# Altium footprint library PBL - SMD Packages.PcbLib: 144 footprints (part 1 of 9)
Each footprint in its own frame and in the unit in brackets; x right, y up, seen from the top. Pads: shape width x height; smd on the part's side, far side on the other; paste and mask are expansions set on the pad; w line width, h text height; cw(c..) or ccw(c..) is an arc to the next point about the centre after c.
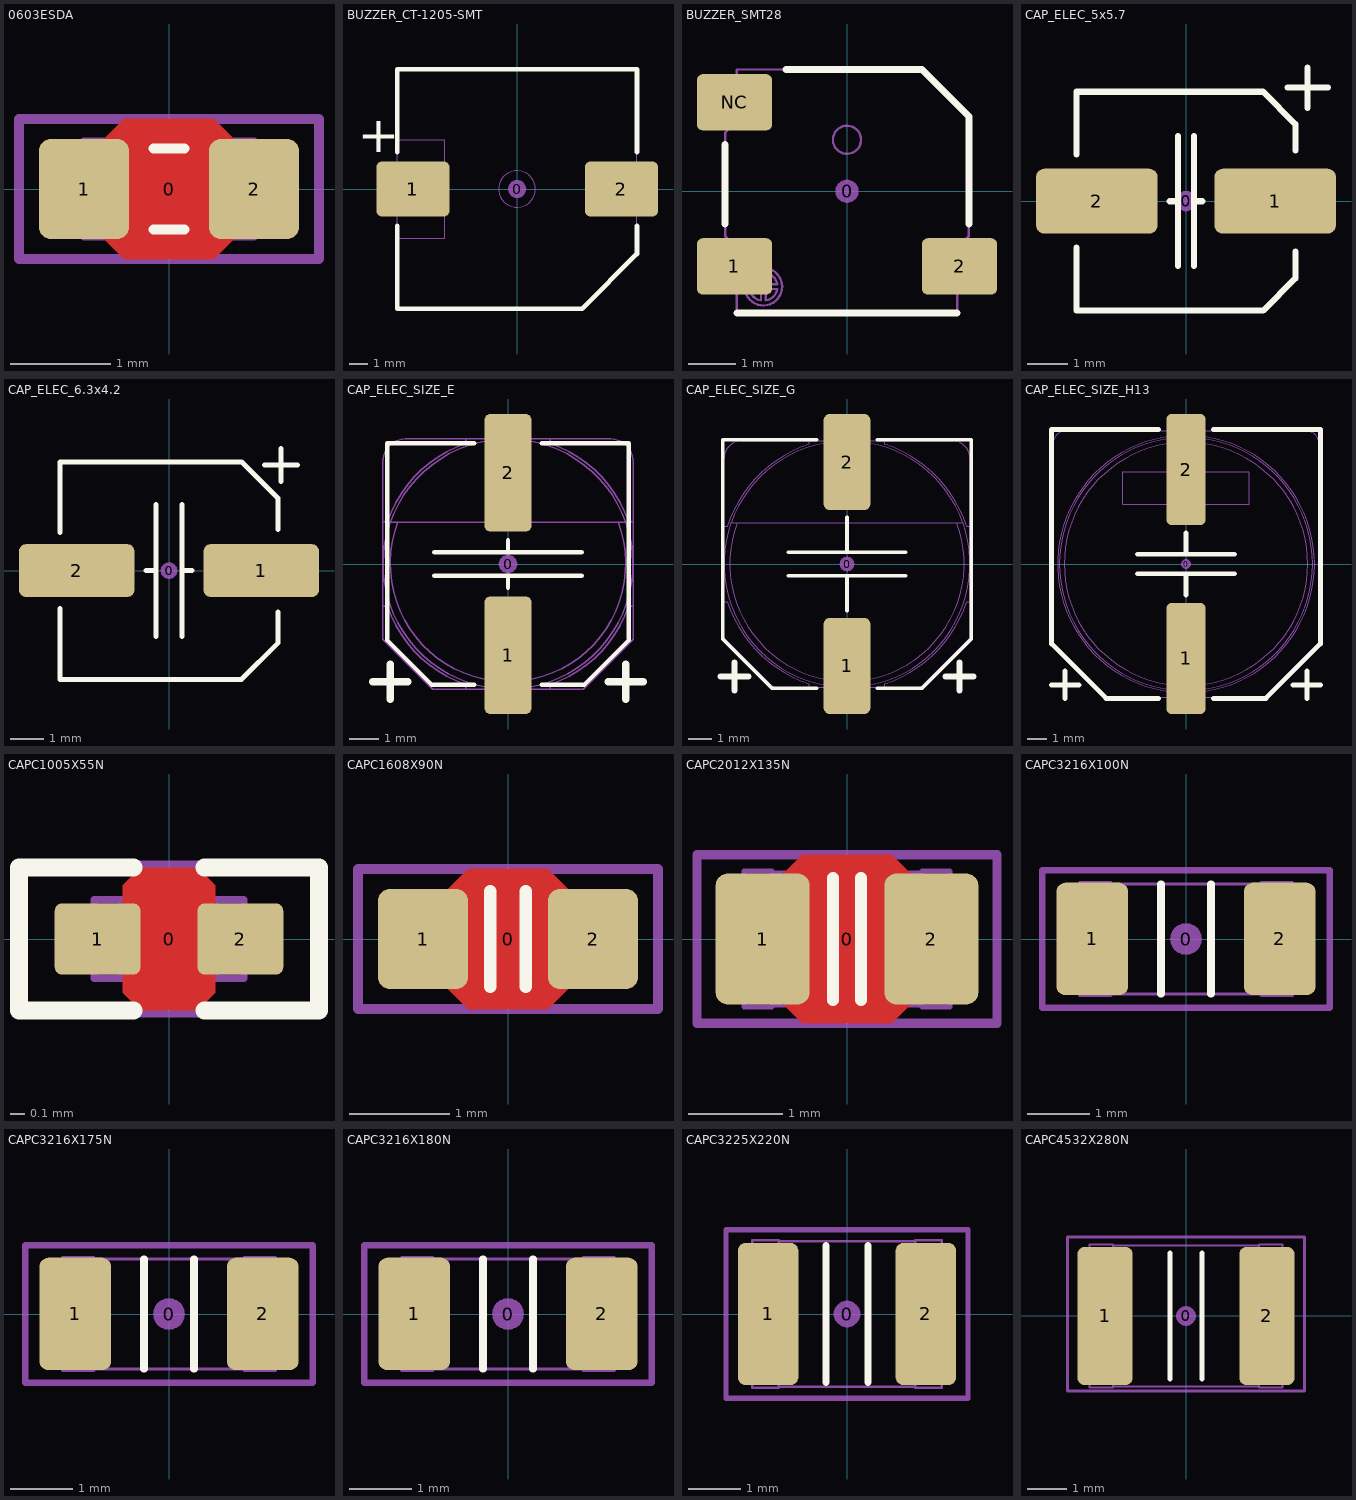
[diagram p0: the footprints below, top view; thin cyan lines are the x and y axes]

## 0603ESDA [mm] "Chip ESD suppressor, Body 1.6x0.8mm, 0603, IPC Medium Density"
height 0.8
pads (3):
  round 0.254 on Mech15: 0(0,0)
  rrect25% 0.9x1 smd: 1(-0.85,0) 2(0.85,0)
Top Layer:
  pour cut-out: -0.65,0.5 -0.45,0.7 0.45,0.7 0.65,0.5 0.65,-0.5 0.45,-0.7 -0.45,-0.7 -0.65,-0.5
Top Overlay:
  lines w0.102: -0.152,-0.406 0.152,-0.406 ; -0.152,0.406 0.152,0.406
13 - 3D Top Side:
  lines w0.076: -0.85,-0.475 0.85,-0.475 0.85,0.475 -0.85,0.475 -0.85,-0.475
15 - Top Courtyards:
  lines w0.1: -1.5,-0.7 1.5,-0.7 1.5,0.7 -1.5,0.7 -1.5,-0.7
3D body: height 0.79, standoff -0.01, extent -0.85,-0.45 0.85,0.45

## BUZZER_CT-1205-SMT [mm] "Buzzer SMD sealed 12.8 L x 12.8 W x 7.6mm H 5Vp"
height 7.6
pads (3):
  round 1 on Mech15: 0(0,0)
  rrect20% 4x3 smd: 1(-5.7,0) 2(5.7,0)
Top Overlay:
  lines w0.254: -6.55,-2 -6.55,-6.55 3.55,-6.55 6.55,-3.55 6.55,-2 ; -6.55,2 -6.55,6.55 6.55,6.55 6.55,2
  text "+" at -8.7,2 h2
13 - 3D Top Side:
  circle w0.05: c0,0 r1
  lines w0.05: -6.65,-1.15 -6.65,1.15 ; -6.55,-2.7 -3.95,-2.7 -3.95,2.7 -6.55,2.7 ; -6.55,-1.15 -7.15,-1.15 -7.15,1.15 -6.55,1.15 ; 6.55,-1.15 7.15,-1.15 7.15,1.15 6.55,1.15 ; 6.65,-1.15 6.65,1.15 ; -6.55,-6.55 -6.55,6.55 6.55,6.55 6.55,-3.55 3.55,-6.55 -6.55,-6.55
3D body: height 7.6, standoff 0, extent -7.15,-6.55 7.15,6.55

## BUZZER_SMT28 [mm] "Buzzer SMD sealed 5.0 L x 5.0 W x 2.0mm H 5Vp"
height 2.2
pads (4):
  round 0.5 on Mech15: 0(0,0)
  rrect20% 1.6x1.2 smd: 1(-2.4,-1.6) 2(2.4,-1.6) NC(-2.4,1.9)
Top Overlay:
  lines w0.15: -2.6,-0.7 -2.6,1 ; -2.35,-2.6 2.35,-2.6 ; -1.3,2.6 1.6,2.6 2.6,1.6 2.6,-0.7
13 - 3D Top Side:
  circle w0.05: c0,1.1 r0.3
  circle w0.05: c-1.784,-2.034 r0.4
  lines w0.05: -2.65,-1.95 -2.65,-1.25 ; -2.65,1.55 -2.65,2.25 ; -2.35,-1.95 -2.75,-1.95 -2.75,-1.25 -2.35,-1.25 ; -2.35,1.55 -2.75,1.55 -2.75,2.25 -2.35,2.25 ; 2.35,-1.95 2.75,-1.95 2.75,-1.25 2.35,-1.25 ; 2.65,-1.95 2.65,-1.25 ; -2.6,-0.95 -2.6,1.25 -2.35,1.5 -2.35,2.6 1.6,2.6 2.6,1.6 2.6,-0.95 2.35,-1.2 2.35,-2.6 -2.35,-2.6 -2.35,-1.2 -2.6,-0.95 ; -2.08,-2.084 ccw(c-1.784,-2.034) -1.834,-2.33 -1.834,-2.084 -2.08,-2.084 ; -2.08,-1.984 cw(c-1.784,-2.034) -1.834,-1.739 -1.834,-1.984 -2.08,-1.984 ; -1.734,-2.33 ccw(c-1.784,-2.034) -1.489,-2.084 -1.734,-2.084 -1.734,-2.33 ; -1.734,-1.984 -1.489,-1.984 ccw(c-1.784,-2.034) -1.734,-1.739 -1.734,-1.984
3D body: height 2, standoff 0, extent -2.75,-2.6 2.75,2.6

## CAP_ELEC_5x5.7 [mm] "Capacitor, polarized, aluminum can; 5x5.7mm DxH"
height 5.7
pads (3):
  round 0.508 on Mech15: 0(0,0)
  rrect25% 3x1.6 smd: 1(2.2,0) 2(-2.2,0)
Top Overlay:
  lines w0.152: -2.7,-1.15 -2.7,-2.7 1.9,-2.7 2.7,-1.9 2.7,-1.25 ; -2.7,1.15 -2.7,2.7 1.9,2.7 2.7,1.9 2.7,1.25 ; -0.4,0 -0.2,0 ; -0.2,-1.6 -0.2,1.6 ; 0.2,-1.6 0.2,1.6 ; 0.2,0 0.4,0 ; 2.5,2.8 3,2.8 3.5,2.8 ; 3,2.3 3,3.3
3D body: height 5.7, standoff 0, extent -2.65,-2.65 2.65,2.65

## CAP_ELEC_6.3x4.2 [mm] "Capacitor, polarized, aluminum can; 6.3x4.2mm DxH"
height 4.2
pads (3):
  round 0.508 on Mech15: 0(0,0)
  rrect25% 3.5x1.6 smd: 1(2.8,0) 2(-2.8,0)
Top Overlay:
  lines w0.152: -3.3,-1.15 -3.3,-3.3 2.2,-3.3 3.3,-2.2 3.3,-1.25 ; -3.3,1.15 -3.3,3.3 2.2,3.3 3.3,2.2 3.3,1.25 ; -0.7,0 -0.5,0 ; -0.4,-2 -0.4,2 ; 0.4,-2 0.4,2 ; 0.5,0 0.7,0 ; 2.9,3.2 3.4,3.2 3.9,3.2 ; 3.4,2.7 3.4,3.7
3D body: height 4.23, standoff 0, extent -3.3,-3.3 3.3,3.3

## CAP_ELEC_SIZE_E [mm] "Capacitor, polarized, aluminum can; 8.0x6.2mm DxH"
height 6.2
pads (3):
  round 0.635 on Mech15: 0(0,0)
  rrect25% 1.6x4 smd: 1(0,-3.1) 2(0,3.1)
Top Overlay:
  lines w0.152: -2.5,-0.4 2.5,-0.4 ; -2.5,0.4 2.5,0.4 ; -1.15,-4.1 -2.6,-4.1 -4.1,-2.6 -4.1,4.1 -1.15,4.1 ; 0,-0.8 0,-0.4 ; 0,0.4 0,0.8 ; 1.15,-4.1 2.6,-4.1 4.1,-2.6 4.1,4.1 1.15,4.1
  lines w0.254: -4.6,-4 -3.4,-4 ; -4,-4.6 -4,-3.4 ; 3.4,-4 4.6,-4 ; 4,-4.6 4,-3.4
13 - 3D Top Side:
  lines w0.05: -4.25,-1.436 -4.106,-1.436 ccw(c0,0) -1.436,-4.106 -1.436,-4.25 ; -4.25,1.436 -4.106,1.436 cw(c0,0) -1.436,4.106 -1.436,4.25 ; -4.005,1.417 cw(c0,0) 4.005,1.417 ; -3.741,1.417 ccw(c0,0) 3.741,1.417 ; -0.325,-4.25 -0.325,-4.75 0.325,-4.75 0.325,-4.25 ; -0.325,4.25 -0.325,4.75 0.325,4.75 0.325,4.25 ; 1.436,-4.25 1.436,-4.106 ccw(c0,0) 4.106,-1.436 4.25,-1.436 ; 1.436,4.25 1.436,4.106 cw(c0,0) 4.106,1.436 4.25,1.436 ; -4.25,-2.55 -4.25,3.5 cw(c-3.5,3.5) -3.5,4.25 3.5,4.25 cw(c3.5,3.5) 4.25,3.5 4.25,-2.55 2.55,-4.25 -2.55,-4.25 -4.25,-2.55 ; -4.007,1.417 ccw(c0,0) 4.007,1.417 -4.007,1.417
3D body: height 6.5, standoff 0, extent -4.25,-4.75 4.25,4.75

## CAP_ELEC_SIZE_G [mm] "Capacitor, polarized, aluminum can; 10.0x10.2mm DxH"
height 10.2
pads (3):
  round 0.635 on Mech15: 0(0,0)
  rrect25% 2x4.1 smd: 1(0,-4.35) 2(0,4.35)
Top Overlay:
  lines w0.152: -2.5,-0.5 2.5,-0.5 ; -2.5,0.5 2.5,0.5 ; -1.3,-5.3 -3.2,-5.3 -5.3,-3.2 -5.3,5.3 -1.3,5.3 ; 0,-2 0,-0.5 ; 0,0.5 0,2 ; 1.3,-5.3 3.2,-5.3 5.3,-3.2 5.3,5.3 1.3,5.3
  lines w0.254: -5.4,-4.8 -4.2,-4.8 ; -4.8,-5.4 -4.8,-4.2 ; 4.2,-4.8 5.4,-4.8 ; 4.8,-5.4 4.8,-4.2
13 - 3D Top Side:
  lines w0.05: -5.25,-1.601 -5.105,-1.601 ccw(c0,0) -1.601,-5.105 -1.601,-5.25 ; -5.25,1.601 -5.105,1.601 cw(c0,0) -1.601,5.105 -1.601,5.25 ; -4.948,1.75 cw(c0,0) 4.948,1.75 ; -4.684,1.75 ccw(c0,0) 4.684,1.75 ; -0.45,-5.25 -0.45,-6 0.45,-6 0.45,-5.25 ; -0.45,5.25 -0.45,6 0.45,6 0.45,5.25 ; 1.601,-5.25 1.601,-5.105 ccw(c0,0) 5.105,-1.601 5.25,-1.601 ; 1.601,5.25 1.601,5.105 cw(c0,0) 5.105,1.601 5.25,1.601 ; -5.25,-3.15 -3.15,-5.25 3.15,-5.25 5.25,-3.15 5.25,4.5 ccw(c4.5,4.5) 4.5,5.25 -4.5,5.25 ccw(c-4.5,4.5) -5.25,4.5 -5.25,-3.15 ; -4.95,1.75 ccw(c0,0) 4.95,1.75 -4.95,1.75
3D body: height 10.5, standoff 0, extent -5.25,-6 5.25,6

## CAP_ELEC_SIZE_H13 [mm] "Capacitor, polarized, aluminum can; 12.5x13.5mm DxH"
height 13.5
pads (3):
  round 0.508 on Mech15: 0(0,0)
  rrect25% 2x5.7 smd: 1(0,-4.85) 2(0,4.85)
Top Overlay:
  lines w0.254: -6.9,-6.2 -5.5,-6.2 ; -6.2,-6.9 -6.2,-5.5 ; -2.5,-0.5 2.5,-0.5 ; -2.5,0.5 2.5,0.5 ; -1.4,-6.9 -4.1,-6.9 -6.9,-4.1 -6.9,6.9 -1.4,6.9 ; 0,-1.6 0,-0.5 ; 0,0.5 0,1.6 ; 1.4,-6.9 4.1,-6.9 6.9,-4.1 6.9,6.9 1.4,6.9 ; 5.5,-6.2 6.9,-6.2 ; 6.2,-6.9 6.2,-5.5
13 - 3D Top Side:
  circle w0.05: c0,0 r6.6
  circle w0.05: c0,0 r6.5
  circle w0.05: c0,0 r6.25
  lines w0.05: -0.45,-6.85 -0.45,-7.5 0.45,-7.5 0.45,-6.85 ; -0.45,6.85 -0.45,7.5 0.45,7.5 0.45,6.85 ; -6.85,-4.11 -4.11,-6.85 4.11,-6.85 6.85,-4.11 6.85,6.1 ccw(c6.1,6.1) 6.1,6.85 -6.1,6.85 ccw(c-6.1,6.1) -6.85,6.1 -6.85,-4.11 ; -3.25,3.055 -3.25,4.745 3.25,4.745 3.25,3.055 -3.25,3.055
3D body: height 14, standoff 0, extent -6.85,-7.5 6.85,7.5

## CAPC1005X55N [mm] "Chip Capacitor, Body 1.0x0.5mm, EIA 0402, IPC Medium Density"
height 0.55
pads (3):
  round 0.2 on Mech15: 0(0,0)
  rrect20% 0.6x0.5 smd: 1(-0.5,0) 2(0.5,0)
Top Layer:
  pour cut-out: -0.325,0.375 -0.2,0.5 0.2,0.5 0.325,0.375 0.325,-0.375 0.2,-0.5 -0.2,-0.5 -0.325,-0.375
Top Overlay:
  lines w0.127: -0.25,-0.5 -1.05,-0.5 -1.05,0.5 -0.25,0.5 ; 0.25,-0.5 1.05,-0.5 1.05,0.5 0.25,0.5
13 - 3D Top Side:
  lines w0.05: -0.325,-0.255 0.325,-0.255 ; -0.325,0.255 0.325,0.255 ; -0.525,-0.275 -0.525,0.275 -0.325,0.275 -0.325,-0.275 -0.525,-0.275 ; 0.325,-0.275 0.525,-0.275 0.525,0.275 0.325,0.275 0.325,-0.275
15 - Top Courtyards:
  lines w0.1: -1.05,-0.5 -1.05,0.5 1.05,0.5 1.05,-0.5 -1.05,-0.5
3D body: height 0.55, standoff 0, extent -0.525,-0.275 0.525,0.275

## CAPC1608X90N [mm] "Chip Capacitor, Body 1.6x0.8mm, EIA 0603, IPC Medium Density"
height 0.9
pads (3):
  round 0.254 on Mech15: 0(0,0)
  rrect25% 0.9x1 smd: 1(-0.85,0) 2(0.85,0)
Top Layer:
  pour cut-out: -0.6,0.5 -0.4,0.7 0.4,0.7 0.6,0.5 0.6,-0.5 0.4,-0.7 -0.4,-0.7 -0.6,-0.5
Top Overlay:
  lines w0.127: -0.178,-0.476 -0.178,0.476 ; 0.178,-0.476 0.178,0.476
13 - 3D Top Side:
  lines w0.05: -0.55,-0.43 0.55,-0.43 ; -0.55,0.43 0.55,0.43 ; -0.85,-0.45 -0.85,0.45 -0.55,0.45 -0.55,-0.45 -0.85,-0.45 ; 0.55,-0.45 0.55,0.45 0.85,0.45 0.85,-0.45 0.55,-0.45
15 - Top Courtyards:
  lines w0.1: -1.5,-0.7 -1.5,0.7 1.5,0.7 1.5,-0.7 -1.5,-0.7
3D body: height 0.89, standoff -0.01, extent -0.85,-0.45 0.85,0.45

## CAPC2012X135N [mm] "Chip Capacitor, Body 2.0x1.2mm, EIA 0805, IPC Medium Density"
height 1.35
pads (3):
  round 0.254 on Mech15: 0(0,0)
  rrect25% 1x1.4 smd: 1(-0.9,0) 2(0.9,0)
Top Layer:
  pour cut-out: -0.675,0.7 -0.475,0.9 0.475,0.9 0.675,0.7 0.675,-0.7 0.475,-0.9 -0.475,-0.9 -0.675,-0.7
Top Overlay:
  lines w0.127: -0.15,-0.651 -0.15,0.651 ; 0.15,-0.651 0.15,0.651
13 - 3D Top Side:
  lines w0.05: -0.8,-0.705 0.8,-0.705 ; -0.8,0.705 0.8,0.705 ; -1.1,-0.725 -1.1,0.725 -0.8,0.725 -0.8,-0.725 -1.1,-0.725 ; 0.8,-0.725 1.1,-0.725 1.1,0.725 0.8,0.725 0.8,-0.725
15 - Top Courtyards:
  lines w0.1: -1.6,-0.9 -1.6,0.9 1.6,0.9 1.6,-0.9 -1.6,-0.9
3D body: height 1.34, standoff -0.01, extent -1.1,-0.725 1.1,0.725

## CAPC3216X100N [mm] "Chip Capacitor, Body 3.2x1.6mm, 1.0mm H, EIA 1206, IPC Medium Density"
height 1
pads (3):
  round 0.508 on Mech15: 0(0,0)
  rrect25% 1.15x1.8 smd: 1(-1.5,0) 2(1.5,0)
Top Overlay:
  lines w0.127: -0.4,-0.876 -0.4,0.876 ; 0.4,-0.876 0.4,0.876
13 - 3D Top Side:
  lines w0.05: -1.2,-0.88 1.2,-0.88 ; -1.2,0.88 1.2,0.88 ; -1.7,-0.9 -1.7,0.9 -1.2,0.9 -1.2,-0.9 -1.7,-0.9 ; 1.2,-0.9 1.2,0.9 1.7,0.9 1.7,-0.9 1.2,-0.9
15 - Top Courtyards:
  lines w0.1: -2.3,-1.1 2.3,-1.1 2.3,1.1 -2.3,1.1 -2.3,-1.1
3D body: height 1, standoff 0, extent -1.7,-0.9 1.7,0.9

## CAPC3216X175N [mm] "Chip Capacitor, Body 3.2x1.6mm, 1.75mm H, EIA 1206, IPC Medium Density"
height 1.75
pads (3):
  round 0.508 on Mech15: 0(0,0)
  rrect25% 1.15x1.8 smd: 1(-1.5,0) 2(1.5,0)
Top Overlay:
  lines w0.127: -0.4,-0.876 -0.4,0.876 ; 0.4,-0.876 0.4,0.876
13 - 3D Top Side:
  lines w0.05: -1.2,-0.88 1.2,-0.88 ; -1.2,0.88 1.2,0.88 ; -1.7,-0.9 -1.2,-0.9 -1.2,0.9 -1.7,0.9 -1.7,-0.9 ; 1.2,-0.9 1.7,-0.9 1.7,0.9 1.2,0.9 1.2,-0.9
15 - Top Courtyards:
  lines w0.1: -2.3,-1.1 -2.3,1.1 2.3,1.1 2.3,-1.1 -2.3,-1.1
3D body: height 1.75, standoff 0, extent -1.7,-0.9 1.7,0.9

## CAPC3216X180N [mm] "Chip Capacitor, Body 3.2x1.6mm, 1.8mm H, EIA 1206, IPC Medium Density"
height 1.8
pads (3):
  round 0.508 on Mech15: 0(0,0)
  rrect25% 1.15x1.8 smd: 1(-1.5,0) 2(1.5,0)
Top Overlay:
  lines w0.127: -0.4,-0.876 -0.4,0.876 ; 0.4,-0.876 0.4,0.876
13 - 3D Top Side:
  lines w0.05: -1.2,-0.88 1.2,-0.88 ; -1.2,0.88 1.2,0.88 ; -1.7,-0.9 -1.2,-0.9 -1.2,0.9 -1.7,0.9 -1.7,-0.9 ; 1.2,-0.9 1.7,-0.9 1.7,0.9 1.2,0.9 1.2,-0.9
15 - Top Courtyards:
  lines w0.1: -2.3,-1.1 -2.3,1.1 2.3,1.1 2.3,-1.1 -2.3,-1.1
3D body: height 1.8, standoff 0, extent -1.7,-0.9 1.7,0.9

## CAPC3225X220N [mm] "Chip Capacitor, Body 3.2x2.5mm, EIA 1210, IPC Medium Density"
height 2.2
pads (3):
  round 0.508 on Mech15: 0(0,0)
  rrect25% 1.15x2.7 smd: 1(-1.5,0) 2(1.5,0)
Top Overlay:
  lines w0.127: -0.4,-1.3 -0.4,1.3 ; 0.4,-1.3 0.4,1.3
13 - 3D Top Side:
  lines w0.05: -1.3,-1.38 1.3,-1.38 ; -1.3,1.38 1.3,1.38 ; -1.8,-1.4 -1.3,-1.4 -1.3,1.4 -1.8,1.4 -1.8,-1.4 ; 1.3,-1.4 1.3,1.4 1.8,1.4 1.8,-1.4 1.3,-1.4
15 - Top Courtyards:
  lines w0.1: -2.3,-1.6 -2.3,1.6 2.3,1.6 2.3,-1.6 -2.3,-1.6
3D body: height 2.19, standoff -0.01, extent -1.8,-1.4 1.8,1.4

## CAPC4532X280N [mm] "Chip Capacitor, Body 4.5x3.2mm, 1812, IPC Medium Density"
height 2.8
pads (3):
  round 0.508 on Mech15: 0(0,0)
  rrect25% 1.4x3.5 smd: 1(-2.05,0) 2(2.05,0)
Top Overlay:
  lines w0.127: -0.4,-1.6 -0.4,1.6 ; 0.4,-1.6 0.4,1.6
13 - 3D Top Side:
  lines w0.05: -1.85,-1.791 1.85,-1.791 ; -1.85,1.791 1.85,1.791 ; -2.45,-1.811 -1.85,-1.811 -1.85,1.811 -2.45,1.811 -2.45,-1.811 ; 1.85,-1.811 1.85,1.811 2.45,1.811 2.45,-1.811 1.85,-1.811
15 - Top Courtyards:
  lines w0.076: -3,-1.9 3,-1.9 3,2 -3,2 -3,-1.9
3D body: height 2.79, standoff -0.01, extent -2.45,-1.8 2.45,1.8